# Altium schematic symbol library WR-TBL_Pluggable Connector.SchLib: 879 symbols (part 7 of 15)
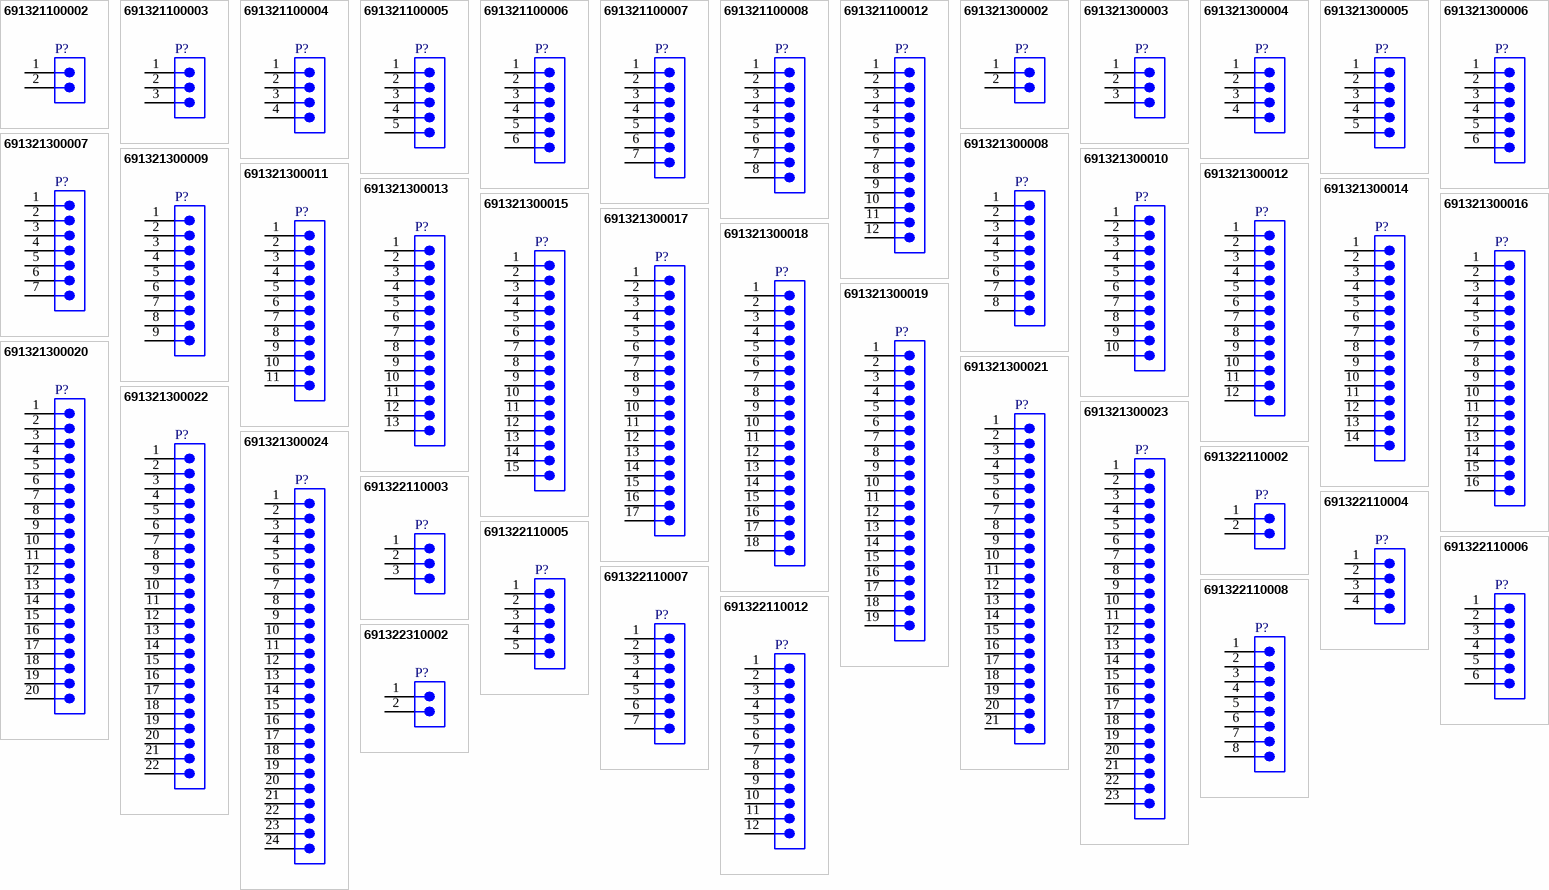
[diagram p27: symbols 691321100002 to 691322310002]

## 691321300018
designator P?  (value not drawn)
WR-TBL Series 321 Vertical PCB Header, THT, pitch 3.81mm, 18p; Manufacturer: Wurth Elektronik; Modularity: No; Rated Current: 10A; Working Voltage: 300V (AC); Manufacturer Part Number: 691321300018; Product Series: WR-TBL; ComponentLink1Description: Website Link; ComponentLink1URL: https://www.we-online.com; ComponentLink2Description: Datasheet Link; ComponentLink2URL: https://www.we-online.com/components/products/datasheet/691321300018; Mount: Through Hole; Operating Temperature Min: -40degC; Operating Temperature Max: 105degC; Packaging: Box; Application: Pluggable; Number of Pins: 18; Number of Rows: 1; Orientation: Vertical; Lead Pitch: 3.81mm
footprint 691321300018
pins: 1, 2, 3, 4, 5, 6, 7, 8, 9, 10, 11, 12, 13, 14, 15, 16, 17, 18

## 691321300019
designator P?  (value not drawn)
WR-TBL Series 321 Vertical PCB Header, THT, pitch 3.81mm, 19p; Manufacturer: Wurth Elektronik; Modularity: No; Rated Current: 10A; Working Voltage: 300V (AC); Manufacturer Part Number: 691321300019; Product Series: WR-TBL; ComponentLink1Description: Website Link; ComponentLink1URL: https://www.we-online.com; ComponentLink2Description: Datasheet Link; ComponentLink2URL: https://www.we-online.com/components/products/datasheet/691321300019; Mount: Through Hole; Operating Temperature Min: -40degC; Operating Temperature Max: 105degC; Packaging: Box; Application: Pluggable; Number of Pins: 19; Number of Rows: 1; Orientation: Vertical; Lead Pitch: 3.81mm
footprint 691321300019
pins: 1, 2, 3, 4, 5, 6, 7, 8, 9, 10, 11, 12, 13, 14, 15, 16, 17, 18, 19

## 691321300020
designator P?  (value not drawn)
WR-TBL Series 321 Vertical PCB Header, THT, pitch 3.81mm, 20p; Manufacturer: Wurth Elektronik; Modularity: No; Rated Current: 10A; Working Voltage: 300V (AC); Manufacturer Part Number: 691321300020; Product Series: WR-TBL; ComponentLink1Description: Website Link; ComponentLink1URL: https://www.we-online.com; ComponentLink2Description: Datasheet Link; ComponentLink2URL: https://www.we-online.com/components/products/datasheet/691321300020; Mount: Through Hole; Operating Temperature Min: -40degC; Operating Temperature Max: 105degC; Packaging: Box; Application: Pluggable; Number of Pins: 20; Number of Rows: 1; Orientation: Vertical; Lead Pitch: 3.81mm
footprint 691321300020
pins: 1, 2, 3, 4, 5, 6, 7, 8, 9, 10, 11, 12, 13, 14, 15, 16, 17, 18, 19, 20

## 691321300021
designator P?  (value not drawn)
WR-TBL Series 321 Vertical PCB Header, THT, pitch 3.81mm, 21p; Manufacturer: Wurth Elektronik; Modularity: No; Rated Current: 10A; Working Voltage: 300V (AC); Manufacturer Part Number: 691321300021; Product Series: WR-TBL; ComponentLink1Description: Website Link; ComponentLink1URL: https://www.we-online.com; ComponentLink2Description: Datasheet Link; ComponentLink2URL: https://www.we-online.com/components/products/datasheet/691321300021; Mount: Through Hole; Operating Temperature Min: -40degC; Operating Temperature Max: 105degC; Packaging: Box; Application: Pluggable; Number of Pins: 21; Number of Rows: 1; Orientation: Vertical; Lead Pitch: 3.81mm
footprint 691321300021
pins: 1, 2, 3, 4, 5, 6, 7, 8, 9, 10, 11, 12, 13, 14, 15, 16, 17, 18, 19, 20, 21

## 691321300022
designator P?  (value not drawn)
WR-TBL Series 321 Vertical PCB Header, THT, pitch 3.81mm, 22p; Manufacturer: Wurth Elektronik; Modularity: No; Rated Current: 10A; Working Voltage: 300V (AC); Manufacturer Part Number: 691321300022; Product Series: WR-TBL; ComponentLink1Description: Website Link; ComponentLink1URL: https://www.we-online.com; ComponentLink2Description: Datasheet Link; ComponentLink2URL: https://www.we-online.com/components/products/datasheet/691321300022; Mount: Through Hole; Operating Temperature Min: -40degC; Operating Temperature Max: 105degC; Packaging: Box; Application: Pluggable; Number of Pins: 22; Number of Rows: 1; Orientation: Vertical; Lead Pitch: 3.81mm
footprint 691321300022
pins: 1, 2, 3, 4, 5, 6, 7, 8, 9, 10, 11, 12, 13, 14, 15, 16, 17, 18, 19, 20, 21, 22

## 691321300023
designator P?  (value not drawn)
WR-TBL Series 321 Vertical PCB Header, THT, pitch 3.81mm, 23p; Manufacturer: Wurth Elektronik; Modularity: No; Rated Current: 10A; Working Voltage: 300V (AC); Manufacturer Part Number: 691321300023; Product Series: WR-TBL; ComponentLink1Description: Website Link; ComponentLink1URL: https://www.we-online.com; ComponentLink2Description: Datasheet Link; ComponentLink2URL: https://www.we-online.com/components/products/datasheet/691321300023; Mount: Through Hole; Operating Temperature Min: -40degC; Operating Temperature Max: 105degC; Packaging: Box; Application: Pluggable; Number of Pins: 23; Number of Rows: 1; Orientation: Vertical; Lead Pitch: 3.81mm
footprint 691321300023
pins: 1, 2, 3, 4, 5, 6, 7, 8, 9, 10, 11, 12, 13, 14, 15, 16, 17, 18, 19, 20, 21, 22, 23

## 691321300024
designator P?  (value not drawn)
WR-TBL Series 321 Vertical PCB Header, THT, pitch 3.81mm, 24p; Manufacturer: Wurth Elektronik; Modularity: No; Rated Current: 10A; Working Voltage: 300V (AC); Manufacturer Part Number: 691321300024; Product Series: WR-TBL; ComponentLink1Description: Website Link; ComponentLink1URL: https://www.we-online.com; ComponentLink2Description: Datasheet Link; ComponentLink2URL: https://www.we-online.com/components/products/datasheet/691321300024; Mount: Through Hole; Operating Temperature Min: -40degC; Operating Temperature Max: 105degC; Packaging: Box; Application: Pluggable; Number of Pins: 24; Number of Rows: 1; Orientation: Vertical; Lead Pitch: 3.81mm
footprint 691321300024
pins: 1, 2, 3, 4, 5, 6, 7, 8, 9, 10, 11, 12, 13, 14, 15, 16, 17, 18, 19, 20, 21, 22, 23, 24

## 691322110002
designator P?  (value not drawn)
WR-TBL Series 3221 Horizontal PCB Header, THT, pitch 3.5mm, 02p; Manufacturer: Wurth Elektronik; Modularity: No; Rated Current: 10A; Working Voltage: 300V (AC); Manufacturer Part Number: 691322110002; Product Series: WR-TBL; ComponentLink1Description: Website Link; ComponentLink1URL: https://www.we-online.com; ComponentLink2Description: Datasheet Link; ComponentLink2URL: https://www.we-online.com/components/products/datasheet/691322110002; Mount: Through Hole; Operating Temperature Min: -40degC; Operating Temperature Max: 105degC; Packaging: Box; Application: Pluggable; Number of Pins: 2; Number of Rows: 1; Orientation: Horizontal; Lead Pitch: 3.5mm
footprint 691322110002
pins: 1, 2

## 691322110003
designator P?  (value not drawn)
WR-TBL Series 3221 Horizontal PCB Header, THT, pitch 3.5mm, 03p; Manufacturer: Wurth Elektronik; Modularity: No; Rated Current: 10A; Working Voltage: 300V (AC); Manufacturer Part Number: 691322110003; Product Series: WR-TBL; ComponentLink1Description: Website Link; ComponentLink1URL: https://www.we-online.com; ComponentLink2Description: Datasheet Link; ComponentLink2URL: https://www.we-online.com/components/products/datasheet/691322110003; Mount: Through Hole; Operating Temperature Min: -40degC; Operating Temperature Max: 105degC; Packaging: Box; Application: Pluggable; Number of Pins: 3; Number of Rows: 1; Orientation: Horizontal; Lead Pitch: 3.5mm
footprint 691322110003
pins: 1, 2, 3

## 691322110004
designator P?  (value not drawn)
WR-TBL Series 3221 Horizontal PCB Header, THT, pitch 3.5mm, 04p; Manufacturer: Wurth Elektronik; Modularity: No; Rated Current: 10A; Working Voltage: 300V (AC); Manufacturer Part Number: 691322110004; Product Series: WR-TBL; ComponentLink1Description: Website Link; ComponentLink1URL: https://www.we-online.com; ComponentLink2Description: Datasheet Link; ComponentLink2URL: https://www.we-online.com/components/products/datasheet/691322110004; Mount: Through Hole; Operating Temperature Min: -40degC; Operating Temperature Max: 105degC; Packaging: Box; Application: Pluggable; Number of Pins: 4; Number of Rows: 1; Orientation: Horizontal; Lead Pitch: 3.5mm
footprint 691322110004
pins: 1, 2, 3, 4

## 691322110005
designator P?  (value not drawn)
WR-TBL Series 3221 Horizontal PCB Header, THT, pitch 3.5mm, 05p; Manufacturer: Wurth Elektronik; Modularity: No; Rated Current: 10A; Working Voltage: 300V (AC); Manufacturer Part Number: 691322110005; Product Series: WR-TBL; ComponentLink1Description: Website Link; ComponentLink1URL: https://www.we-online.com; ComponentLink2Description: Datasheet Link; ComponentLink2URL: https://www.we-online.com/components/products/datasheet/691322110005; Mount: Through Hole; Operating Temperature Min: -40degC; Operating Temperature Max: 105degC; Packaging: Box; Application: Pluggable; Number of Pins: 5; Number of Rows: 1; Orientation: Horizontal; Lead Pitch: 3.5mm
footprint 691322110005
pins: 1, 2, 3, 4, 5

## 691322110006
designator P?  (value not drawn)
WR-TBL Series 3221 Horizontal PCB Header, THT, pitch 3.5mm, 06p; Manufacturer: Wurth Elektronik; Modularity: No; Rated Current: 10A; Working Voltage: 300V (AC); Manufacturer Part Number: 691322110006; Product Series: WR-TBL; ComponentLink1Description: Website Link; ComponentLink1URL: https://www.we-online.com; ComponentLink2Description: Datasheet Link; ComponentLink2URL: https://www.we-online.com/components/products/datasheet/691322110006; Mount: Through Hole; Operating Temperature Min: -40degC; Operating Temperature Max: 105degC; Packaging: Box; Application: Pluggable; Number of Pins: 6; Number of Rows: 1; Orientation: Horizontal; Lead Pitch: 3.5mm
footprint 691322110006
pins: 1, 2, 3, 4, 5, 6

## 691322110007
designator P?  (value not drawn)
WR-TBL Series 3221 Horizontal PCB Header, THT, pitch 3.5mm, 07p; Manufacturer: Wurth Elektronik; Modularity: No; Rated Current: 10A; Working Voltage: 300V (AC); Manufacturer Part Number: 691322110007; Product Series: WR-TBL; ComponentLink1Description: Website Link; ComponentLink1URL: https://www.we-online.com; ComponentLink2Description: Datasheet Link; ComponentLink2URL: https://www.we-online.com/components/products/datasheet/691322110007; Mount: Through Hole; Operating Temperature Min: -40degC; Operating Temperature Max: 105degC; Packaging: Box; Application: Pluggable; Number of Pins: 7; Number of Rows: 1; Orientation: Horizontal; Lead Pitch: 3.5mm
footprint 691322110007
pins: 1, 2, 3, 4, 5, 6, 7

## 691322110008
designator P?  (value not drawn)
WR-TBL Series 3221 Horizontal PCB Header, THT, pitch 3.5mm, 08p; Manufacturer: Wurth Elektronik; Modularity: No; Rated Current: 10A; Working Voltage: 300V (AC); Manufacturer Part Number: 691322110008; Product Series: WR-TBL; ComponentLink1Description: Website Link; ComponentLink1URL: https://www.we-online.com; ComponentLink2Description: Datasheet Link; ComponentLink2URL: https://www.we-online.com/components/products/datasheet/691322110008; Mount: Through Hole; Operating Temperature Min: -40degC; Operating Temperature Max: 105degC; Packaging: Box; Application: Pluggable; Number of Pins: 8; Number of Rows: 1; Orientation: Horizontal; Lead Pitch: 3.5mm
footprint 691322110008
pins: 1, 2, 3, 4, 5, 6, 7, 8

## 691322110012
designator P?  (value not drawn)
WR-TBL Series 3221 Horizontal PCB Header, THT, pitch 3.5mm, 12p; Manufacturer: Wurth Elektronik; Modularity: No; Rated Current: 10A; Working Voltage: 300V (AC); Manufacturer Part Number: 691322110012; Product Series: WR-TBL; ComponentLink1Description: Website Link; ComponentLink1URL: https://www.we-online.com; ComponentLink2Description: Datasheet Link; ComponentLink2URL: https://www.we-online.com/components/products/datasheet/691322110012; Mount: Through Hole; Operating Temperature Min: -40degC; Operating Temperature Max: 105degC; Packaging: Box; Application: Pluggable; Number of Pins: 12; Number of Rows: 1; Orientation: Horizontal; Lead Pitch: 3.5mm
footprint 691322110012
pins: 1, 2, 3, 4, 5, 6, 7, 8, 9, 10, 11, 12

## 691322310002
designator P?  (value not drawn)
WR-TBL Series 322 Horizontal PCB Header, THT, pitch 3.81mm, 02p; Manufacturer: Wurth Elektronik; Modularity: No; Rated Current: 10A; Working Voltage: 300V (AC); Manufacturer Part Number: 691322310002; Product Series: WR-TBL; ComponentLink1Description: Website Link; ComponentLink1URL: https://www.we-online.com; ComponentLink2Description: Datasheet Link; ComponentLink2URL: https://www.we-online.com/components/products/datasheet/691322310002; Mount: Through Hole; Operating Temperature Min: -40degC; Operating Temperature Max: 105degC; Packaging: Box; Application: Pluggable; Number of Pins: 2; Number of Rows: 1; Orientation: Horizontal; Lead Pitch: 3.81mm
footprint 691322310002
pins: 1, 2

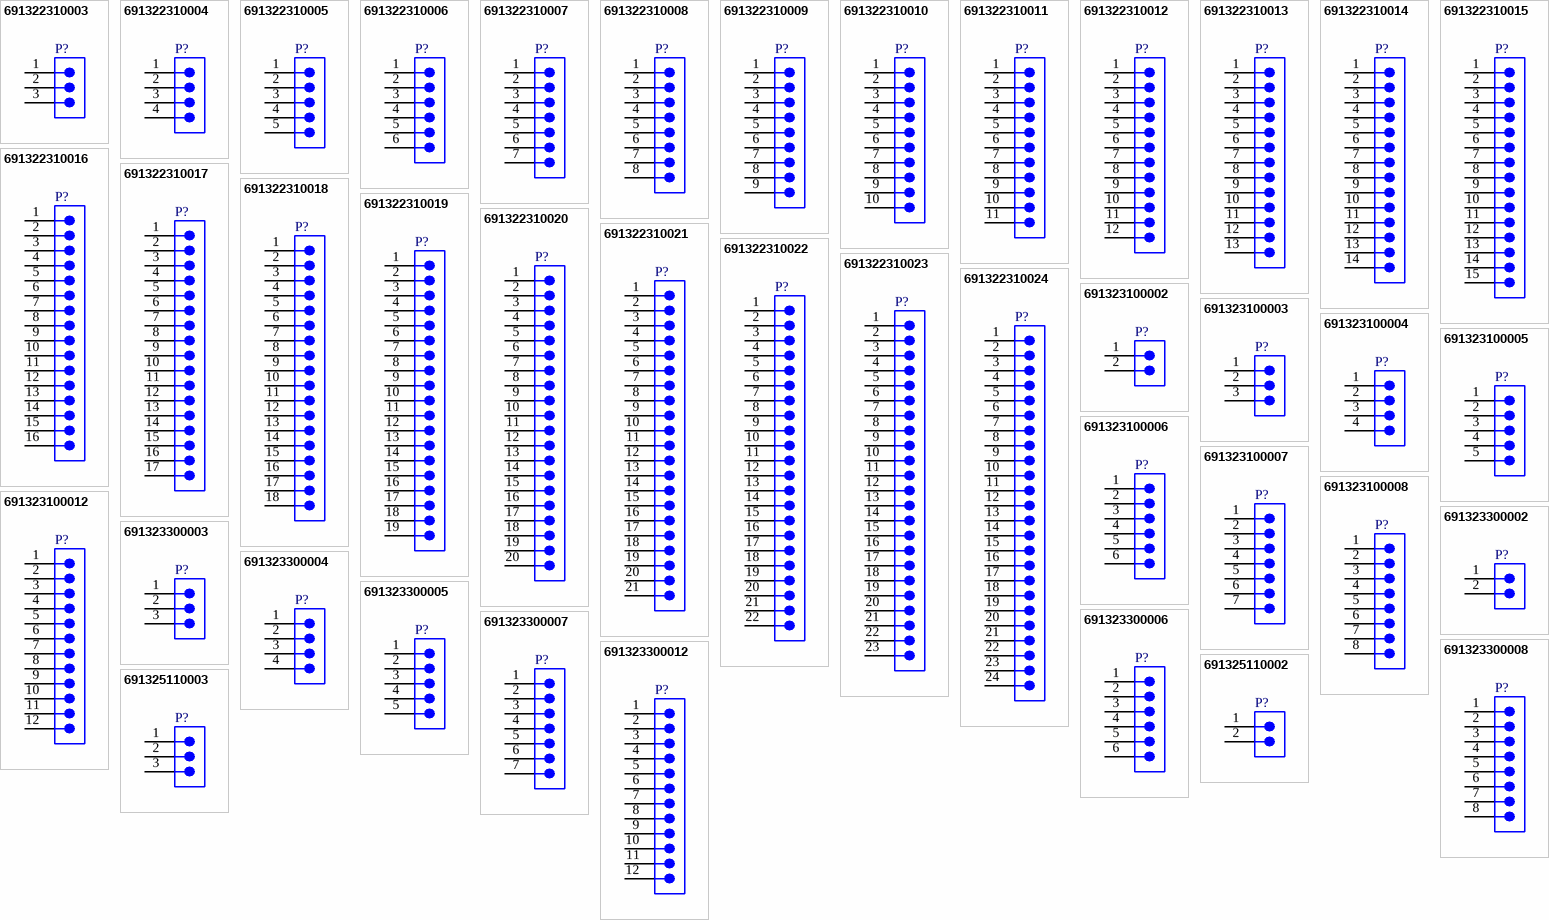
[diagram p10: symbols 691322310003 to 691325110003]

## 691322310003
designator P?  (value not drawn)
WR-TBL Series 322 Horizontal PCB Header, THT, pitch 3.81mm, 03p; Manufacturer: Wurth Elektronik; Modularity: No; Rated Current: 10A; Working Voltage: 300V (AC); Manufacturer Part Number: 691322310003; Product Series: WR-TBL; ComponentLink1Description: Website Link; ComponentLink1URL: https://www.we-online.com; ComponentLink2Description: Datasheet Link; ComponentLink2URL: https://www.we-online.com/components/products/datasheet/691322310003; Mount: Through Hole; Operating Temperature Min: -40degC; Operating Temperature Max: 105degC; Packaging: Box; Application: Pluggable; Number of Pins: 3; Number of Rows: 1; Orientation: Horizontal; Lead Pitch: 3.81mm
footprint 691322310003
pins: 1, 2, 3

## 691322310004
designator P?  (value not drawn)
WR-TBL Series 322 Horizontal PCB Header, THT, pitch 3.81mm, 04p; Manufacturer: Wurth Elektronik; Modularity: No; Rated Current: 10A; Working Voltage: 300V (AC); Manufacturer Part Number: 691322310004; Product Series: WR-TBL; ComponentLink1Description: Website Link; ComponentLink1URL: https://www.we-online.com; ComponentLink2Description: Datasheet Link; ComponentLink2URL: https://www.we-online.com/components/products/datasheet/691322310004; Mount: Through Hole; Operating Temperature Min: -40degC; Operating Temperature Max: 105degC; Packaging: Box; Application: Pluggable; Number of Pins: 4; Number of Rows: 1; Orientation: Horizontal; Lead Pitch: 3.81mm
footprint 691322310004
pins: 1, 2, 3, 4

## 691322310005
designator P?  (value not drawn)
WR-TBL Series 322 Horizontal PCB Header, THT, pitch 3.81mm, 05p; Manufacturer: Wurth Elektronik; Modularity: No; Rated Current: 10A; Working Voltage: 300V (AC); Manufacturer Part Number: 691322310005; Product Series: WR-TBL; ComponentLink1Description: Website Link; ComponentLink1URL: https://www.we-online.com; ComponentLink2Description: Datasheet Link; ComponentLink2URL: https://www.we-online.com/components/products/datasheet/691322310005; Mount: Through Hole; Operating Temperature Min: -40degC; Operating Temperature Max: 105degC; Packaging: Box; Application: Pluggable; Number of Pins: 5; Number of Rows: 1; Orientation: Horizontal; Lead Pitch: 3.81mm
footprint 691322310005
pins: 1, 2, 3, 4, 5

## 691322310006
designator P?  (value not drawn)
WR-TBL Series 322 Horizontal PCB Header, THT, pitch 3.81mm, 06p; Manufacturer: Wurth Elektronik; Modularity: No; Rated Current: 10A; Working Voltage: 300V (AC); Manufacturer Part Number: 691322310006; Product Series: WR-TBL; ComponentLink1Description: Website Link; ComponentLink1URL: https://www.we-online.com; ComponentLink2Description: Datasheet Link; ComponentLink2URL: https://www.we-online.com/components/products/datasheet/691322310006; Mount: Through Hole; Operating Temperature Min: -40degC; Operating Temperature Max: 105degC; Packaging: Box; Application: Pluggable; Number of Pins: 6; Number of Rows: 1; Orientation: Horizontal; Lead Pitch: 3.81mm
footprint 691322310006
pins: 1, 2, 3, 4, 5, 6

## 691322310007
designator P?  (value not drawn)
WR-TBL Series 322 Horizontal PCB Header, THT, pitch 3.81mm, 07p; Manufacturer: Wurth Elektronik; Modularity: No; Rated Current: 10A; Working Voltage: 300V (AC); Manufacturer Part Number: 691322310007; Product Series: WR-TBL; ComponentLink1Description: Website Link; ComponentLink1URL: https://www.we-online.com; ComponentLink2Description: Datasheet Link; ComponentLink2URL: https://www.we-online.com/components/products/datasheet/691322310007; Mount: Through Hole; Operating Temperature Min: -40degC; Operating Temperature Max: 105degC; Packaging: Box; Application: Pluggable; Number of Pins: 7; Number of Rows: 1; Orientation: Horizontal; Lead Pitch: 3.81mm
footprint 691322310007
pins: 1, 2, 3, 4, 5, 6, 7

## 691322310008
designator P?  (value not drawn)
WR-TBL Series 322 Horizontal PCB Header, THT, pitch 3.81mm, 08p; Manufacturer: Wurth Elektronik; Modularity: No; Rated Current: 10A; Working Voltage: 300V (AC); Manufacturer Part Number: 691322310008; Product Series: WR-TBL; ComponentLink1Description: Website Link; ComponentLink1URL: https://www.we-online.com; ComponentLink2Description: Datasheet Link; ComponentLink2URL: https://www.we-online.com/components/products/datasheet/691322310008; Mount: Through Hole; Operating Temperature Min: -40degC; Operating Temperature Max: 105degC; Packaging: Box; Application: Pluggable; Number of Pins: 8; Number of Rows: 1; Orientation: Horizontal; Lead Pitch: 3.81mm
footprint 691322310008
pins: 1, 2, 3, 4, 5, 6, 7, 8

## 691322310009
designator P?  (value not drawn)
WR-TBL Series 322 Horizontal PCB Header, THT, pitch 3.81mm, 09p; Manufacturer: Wurth Elektronik; Modularity: No; Rated Current: 10A; Working Voltage: 300V (AC); Manufacturer Part Number: 691322310009; Product Series: WR-TBL; ComponentLink1Description: Website Link; ComponentLink1URL: https://www.we-online.com; ComponentLink2Description: Datasheet Link; ComponentLink2URL: https://www.we-online.com/components/products/datasheet/691322310009; Mount: Through Hole; Operating Temperature Min: -40degC; Operating Temperature Max: 105degC; Packaging: Box; Application: Pluggable; Number of Pins: 9; Number of Rows: 1; Orientation: Horizontal; Lead Pitch: 3.81mm
footprint 691322310009
pins: 1, 2, 3, 4, 5, 6, 7, 8, 9

## 691322310010
designator P?  (value not drawn)
WR-TBL Series 322 Horizontal PCB Header, THT, pitch 3.81mm, 10p; Manufacturer: Wurth Elektronik; Modularity: No; Rated Current: 10A; Working Voltage: 300V (AC); Manufacturer Part Number: 691322310010; Product Series: WR-TBL; ComponentLink1Description: Website Link; ComponentLink1URL: https://www.we-online.com; ComponentLink2Description: Datasheet Link; ComponentLink2URL: https://www.we-online.com/components/products/datasheet/691322310010; Mount: Through Hole; Operating Temperature Min: -40degC; Operating Temperature Max: 105degC; Packaging: Box; Application: Pluggable; Number of Pins: 10; Number of Rows: 1; Orientation: Horizontal; Lead Pitch: 3.81mm
footprint 691322310010
pins: 1, 2, 3, 4, 5, 6, 7, 8, 9, 10

## 691322310011
designator P?  (value not drawn)
WR-TBL Series 322 Horizontal PCB Header, THT, pitch 3.81mm, 11p; Manufacturer: Wurth Elektronik; Modularity: No; Rated Current: 10A; Working Voltage: 300V (AC); Manufacturer Part Number: 691322310011; Product Series: WR-TBL; ComponentLink1Description: Website Link; ComponentLink1URL: https://www.we-online.com; ComponentLink2Description: Datasheet Link; ComponentLink2URL: https://www.we-online.com/components/products/datasheet/691322310011; Mount: Through Hole; Operating Temperature Min: -40degC; Operating Temperature Max: 105degC; Packaging: Box; Application: Pluggable; Number of Pins: 11; Number of Rows: 1; Orientation: Horizontal; Lead Pitch: 3.81mm
footprint 691322310011
pins: 1, 2, 3, 4, 5, 6, 7, 8, 9, 10, 11

## 691322310012
designator P?  (value not drawn)
WR-TBL Series 322 Horizontal PCB Header, THT, pitch 3.81mm, 12p; Manufacturer: Wurth Elektronik; Modularity: No; Rated Current: 10A; Working Voltage: 300V (AC); Manufacturer Part Number: 691322310012; Product Series: WR-TBL; ComponentLink1Description: Website Link; ComponentLink1URL: https://www.we-online.com; ComponentLink2Description: Datasheet Link; ComponentLink2URL: https://www.we-online.com/components/products/datasheet/691322310012; Mount: Through Hole; Operating Temperature Min: -40degC; Operating Temperature Max: 105degC; Packaging: Box; Application: Pluggable; Number of Pins: 12; Number of Rows: 1; Orientation: Horizontal; Lead Pitch: 3.81mm
footprint 691322310012
pins: 1, 2, 3, 4, 5, 6, 7, 8, 9, 10, 11, 12

## 691322310013
designator P?  (value not drawn)
WR-TBL Series 322 Horizontal PCB Header, THT, pitch 3.81mm, 13p; Manufacturer: Wurth Elektronik; Modularity: No; Rated Current: 10A; Working Voltage: 300V (AC); Manufacturer Part Number: 691322310013; Product Series: WR-TBL; ComponentLink1Description: Website Link; ComponentLink1URL: https://www.we-online.com; ComponentLink2Description: Datasheet Link; ComponentLink2URL: https://www.we-online.com/components/products/datasheet/691322310013; Mount: Through Hole; Operating Temperature Min: -40degC; Operating Temperature Max: 105degC; Packaging: Box; Application: Pluggable; Number of Pins: 13; Number of Rows: 1; Orientation: Horizontal; Lead Pitch: 3.81mm
footprint 691322310013
pins: 1, 2, 3, 4, 5, 6, 7, 8, 9, 10, 11, 12, 13

## 691322310014
designator P?  (value not drawn)
WR-TBL Series 322 Horizontal PCB Header, THT, pitch 3.81mm, 14p; Manufacturer: Wurth Elektronik; Modularity: No; Rated Current: 10A; Working Voltage: 300V (AC); Manufacturer Part Number: 691322310014; Product Series: WR-TBL; ComponentLink1Description: Website Link; ComponentLink1URL: https://www.we-online.com; ComponentLink2Description: Datasheet Link; ComponentLink2URL: https://www.we-online.com/components/products/datasheet/691322310014; Mount: Through Hole; Operating Temperature Min: -40degC; Operating Temperature Max: 105degC; Packaging: Box; Application: Pluggable; Number of Pins: 14; Number of Rows: 1; Orientation: Horizontal; Lead Pitch: 3.81mm
footprint 691322310014
pins: 1, 2, 3, 4, 5, 6, 7, 8, 9, 10, 11, 12, 13, 14

## 691322310015
designator P?  (value not drawn)
WR-TBL Series 322 Horizontal PCB Header, THT, pitch 3.81mm, 15p; Manufacturer: Wurth Elektronik; Modularity: No; Rated Current: 10A; Working Voltage: 300V (AC); Manufacturer Part Number: 691322310015; Product Series: WR-TBL; ComponentLink1Description: Website Link; ComponentLink1URL: https://www.we-online.com; ComponentLink2Description: Datasheet Link; ComponentLink2URL: https://www.we-online.com/components/products/datasheet/691322310015; Mount: Through Hole; Operating Temperature Min: -40degC; Operating Temperature Max: 105degC; Packaging: Box; Application: Pluggable; Number of Pins: 15; Number of Rows: 1; Orientation: Horizontal; Lead Pitch: 3.81mm
footprint 691322310015
pins: 1, 2, 3, 4, 5, 6, 7, 8, 9, 10, 11, 12, 13, 14, 15

## 691322310016
designator P?  (value not drawn)
WR-TBL Series 322 Horizontal PCB Header, THT, pitch 3.81mm, 16p; Manufacturer: Wurth Elektronik; Modularity: No; Rated Current: 10A; Working Voltage: 300V (AC); Manufacturer Part Number: 691322310016; Product Series: WR-TBL; ComponentLink1Description: Website Link; ComponentLink1URL: https://www.we-online.com; ComponentLink2Description: Datasheet Link; ComponentLink2URL: https://www.we-online.com/components/products/datasheet/691322310016; Mount: Through Hole; Operating Temperature Min: -40degC; Operating Temperature Max: 105degC; Packaging: Box; Application: Pluggable; Number of Pins: 16; Number of Rows: 1; Orientation: Horizontal; Lead Pitch: 3.81mm
footprint 691322310016
pins: 1, 2, 3, 4, 5, 6, 7, 8, 9, 10, 11, 12, 13, 14, 15, 16

## 691322310017
designator P?  (value not drawn)
WR-TBL Series 322 Horizontal PCB Header, THT, pitch 3.81mm, 17p; Manufacturer: Wurth Elektronik; Modularity: No; Rated Current: 10A; Working Voltage: 300V (AC); Manufacturer Part Number: 691322310017; Product Series: WR-TBL; ComponentLink1Description: Website Link; ComponentLink1URL: https://www.we-online.com; ComponentLink2Description: Datasheet Link; ComponentLink2URL: https://www.we-online.com/components/products/datasheet/691322310017; Mount: Through Hole; Operating Temperature Min: -40degC; Operating Temperature Max: 105degC; Packaging: Box; Application: Pluggable; Number of Pins: 17; Number of Rows: 1; Orientation: Horizontal; Lead Pitch: 3.81mm
footprint 691322310017
pins: 1, 2, 3, 4, 5, 6, 7, 8, 9, 10, 11, 12, 13, 14, 15, 16, 17

## 691322310018
designator P?  (value not drawn)
WR-TBL Series 322 Horizontal PCB Header, THT, pitch 3.81mm, 18p; Manufacturer: Wurth Elektronik; Modularity: No; Rated Current: 10A; Working Voltage: 300V (AC); Manufacturer Part Number: 691322310018; Product Series: WR-TBL; ComponentLink1Description: Website Link; ComponentLink1URL: https://www.we-online.com; ComponentLink2Description: Datasheet Link; ComponentLink2URL: https://www.we-online.com/components/products/datasheet/691322310018; Mount: Through Hole; Operating Temperature Min: -40degC; Operating Temperature Max: 105degC; Packaging: Box; Application: Pluggable; Number of Pins: 18; Number of Rows: 1; Orientation: Horizontal; Lead Pitch: 3.81mm
footprint 691322310018
pins: 1, 2, 3, 4, 5, 6, 7, 8, 9, 10, 11, 12, 13, 14, 15, 16, 17, 18

## 691322310019
designator P?  (value not drawn)
WR-TBL Series 322 Horizontal PCB Header, THT, pitch 3.81mm, 19p; Manufacturer: Wurth Elektronik; Modularity: No; Rated Current: 10A; Working Voltage: 300V (AC); Manufacturer Part Number: 691322310019; Product Series: WR-TBL; ComponentLink1Description: Website Link; ComponentLink1URL: https://www.we-online.com; ComponentLink2Description: Datasheet Link; ComponentLink2URL: https://www.we-online.com/components/products/datasheet/691322310019; Mount: Through Hole; Operating Temperature Min: -40degC; Operating Temperature Max: 105degC; Packaging: Box; Application: Pluggable; Number of Pins: 19; Number of Rows: 1; Orientation: Horizontal; Lead Pitch: 3.81mm
footprint 691322310019
pins: 1, 2, 3, 4, 5, 6, 7, 8, 9, 10, 11, 12, 13, 14, 15, 16, 17, 18, 19

## 691322310020
designator P?  (value not drawn)
WR-TBL Series 322 Horizontal PCB Header, THT, pitch 3.81mm, 20p; Manufacturer: Wurth Elektronik; Modularity: No; Rated Current: 10A; Working Voltage: 300V (AC); Manufacturer Part Number: 691322310020; Product Series: WR-TBL; ComponentLink1Description: Website Link; ComponentLink1URL: https://www.we-online.com; ComponentLink2Description: Datasheet Link; ComponentLink2URL: https://www.we-online.com/components/products/datasheet/691322310020; Mount: Through Hole; Operating Temperature Min: -40degC; Operating Temperature Max: 105degC; Packaging: Box; Application: Pluggable; Number of Pins: 20; Number of Rows: 1; Orientation: Horizontal; Lead Pitch: 3.81mm
footprint 691322310020
pins: 1, 2, 3, 4, 5, 6, 7, 8, 9, 10, 11, 12, 13, 14, 15, 16, 17, 18, 19, 20

## 691322310021
designator P?  (value not drawn)
WR-TBL Series 322 Horizontal PCB Header, THT, pitch 3.81mm, 21p; Manufacturer: Wurth Elektronik; Modularity: No; Rated Current: 10A; Working Voltage: 300V (AC); Manufacturer Part Number: 691322310021; Product Series: WR-TBL; ComponentLink1Description: Website Link; ComponentLink1URL: https://www.we-online.com; ComponentLink2Description: Datasheet Link; ComponentLink2URL: https://www.we-online.com/components/products/datasheet/691322310021; Mount: Through Hole; Operating Temperature Min: -40degC; Operating Temperature Max: 105degC; Packaging: Box; Application: Pluggable; Number of Pins: 21; Number of Rows: 1; Orientation: Horizontal; Lead Pitch: 3.81mm
footprint 691322310021
pins: 1, 2, 3, 4, 5, 6, 7, 8, 9, 10, 11, 12, 13, 14, 15, 16, 17, 18, 19, 20, 21

## 691322310022
designator P?  (value not drawn)
WR-TBL Series 322 Horizontal PCB Header, THT, pitch 3.81mm, 22p; Manufacturer: Wurth Elektronik; Modularity: No; Rated Current: 10A; Working Voltage: 300V (AC); Manufacturer Part Number: 691322310022; Product Series: WR-TBL; ComponentLink1Description: Website Link; ComponentLink1URL: https://www.we-online.com; ComponentLink2Description: Datasheet Link; ComponentLink2URL: https://www.we-online.com/components/products/datasheet/691322310022; Mount: Through Hole; Operating Temperature Min: -40degC; Operating Temperature Max: 105degC; Packaging: Box; Application: Pluggable; Number of Pins: 22; Number of Rows: 1; Orientation: Horizontal; Lead Pitch: 3.81mm
footprint 691322310022
pins: 1, 2, 3, 4, 5, 6, 7, 8, 9, 10, 11, 12, 13, 14, 15, 16, 17, 18, 19, 20, 21, 22

## 691322310023
designator P?  (value not drawn)
WR-TBL Series 322 Horizontal PCB Header, THT, pitch 3.81mm, 23p; Manufacturer: Wurth Elektronik; Modularity: No; Rated Current: 10A; Working Voltage: 300V (AC); Manufacturer Part Number: 691322310023; Product Series: WR-TBL; ComponentLink1Description: Website Link; ComponentLink1URL: https://www.we-online.com; ComponentLink2Description: Datasheet Link; ComponentLink2URL: https://www.we-online.com/components/products/datasheet/691322310023; Mount: Through Hole; Operating Temperature Min: -40degC; Operating Temperature Max: 105degC; Packaging: Box; Application: Pluggable; Number of Pins: 23; Number of Rows: 1; Orientation: Horizontal; Lead Pitch: 3.81mm
footprint 691322310023
pins: 1, 2, 3, 4, 5, 6, 7, 8, 9, 10, 11, 12, 13, 14, 15, 16, 17, 18, 19, 20, 21, 22, 23

## 691322310024
designator P?  (value not drawn)
WR-TBL Series 322 Horizontal PCB Header, THT, pitch 3.81mm, 24p; Manufacturer: Wurth Elektronik; Modularity: No; Rated Current: 10A; Working Voltage: 300V (AC); Manufacturer Part Number: 691322310024; Product Series: WR-TBL; ComponentLink1Description: Website Link; ComponentLink1URL: https://www.we-online.com; ComponentLink2Description: Datasheet Link; ComponentLink2URL: https://www.we-online.com/components/products/datasheet/691322310024; Mount: Through Hole; Operating Temperature Min: -40degC; Operating Temperature Max: 105degC; Packaging: Box; Application: Pluggable; Number of Pins: 24; Number of Rows: 1; Orientation: Horizontal; Lead Pitch: 3.81mm
footprint 691322310024
pins: 1, 2, 3, 4, 5, 6, 7, 8, 9, 10, 11, 12, 13, 14, 15, 16, 17, 18, 19, 20, 21, 22, 23, 24

## 691323100002
designator P?  (value not drawn)
WR-TBL Series 3231 Vertical PCB Header with Flanges, THT, pitch 3.5mm, 02p; Manufacturer: Wurth Elektronik; Modularity: No; Rated Current: 10A; Working Voltage: 300V (AC); Manufacturer Part Number: 691323100002; Product Series: WR-TBL; ComponentLink1Description: Website Link; ComponentLink1URL: https://www.we-online.com; ComponentLink2Description: Datasheet Link; ComponentLink2URL: https://www.we-online.com/components/products/datasheet/691323100002; Mount: Through Hole; Operating Temperature Min: -40degC; Operating Temperature Max: 105degC; Packaging: Box; Application: Pluggable; Number of Pins: 2; Number of Rows: 1; Orientation: Vertical; Lead Pitch: 3.5mm
footprint 691323100002
pins: 1, 2

## 691323100003
designator P?  (value not drawn)
WR-TBL Series 3231 Vertical PCB Header with Flanges, THT, pitch 3.5mm, 03p; Manufacturer: Wurth Elektronik; Modularity: No; Rated Current: 10A; Working Voltage: 300V (AC); Manufacturer Part Number: 691323100003; Product Series: WR-TBL; ComponentLink1Description: Website Link; ComponentLink1URL: https://www.we-online.com; ComponentLink2Description: Datasheet Link; ComponentLink2URL: https://www.we-online.com/components/products/datasheet/691323100003; Mount: Through Hole; Operating Temperature Min: -40degC; Operating Temperature Max: 105degC; Packaging: Box; Application: Pluggable; Number of Pins: 3; Number of Rows: 1; Orientation: Vertical; Lead Pitch: 3.5mm
footprint 691323100003
pins: 1, 2, 3

## 691323100004
designator P?  (value not drawn)
WR-TBL Series 3231 Vertical PCB Header with Flanges, THT, pitch 3.5mm, 04p; Manufacturer: Wurth Elektronik; Modularity: No; Rated Current: 10A; Working Voltage: 300V (AC); Manufacturer Part Number: 691323100004; Product Series: WR-TBL; ComponentLink1Description: Website Link; ComponentLink1URL: https://www.we-online.com; ComponentLink2Description: Datasheet Link; ComponentLink2URL: https://www.we-online.com/components/products/datasheet/691323100004; Mount: Through Hole; Operating Temperature Min: -40degC; Operating Temperature Max: 105degC; Packaging: Box; Application: Pluggable; Number of Pins: 4; Number of Rows: 1; Orientation: Vertical; Lead Pitch: 3.5mm
footprint 691323100004
pins: 1, 2, 3, 4

## 691323100005
designator P?  (value not drawn)
WR-TBL Series 3231 Vertical PCB Header with Flanges, THT, pitch 3.5mm, 05p; Manufacturer: Wurth Elektronik; Modularity: No; Rated Current: 10A; Working Voltage: 300V (AC); Manufacturer Part Number: 691323100005; Product Series: WR-TBL; ComponentLink1Description: Website Link; ComponentLink1URL: https://www.we-online.com; ComponentLink2Description: Datasheet Link; ComponentLink2URL: https://www.we-online.com/components/products/datasheet/691323100005; Mount: Through Hole; Operating Temperature Min: -40degC; Operating Temperature Max: 105degC; Packaging: Box; Application: Pluggable; Number of Pins: 5; Number of Rows: 1; Orientation: Vertical; Lead Pitch: 3.5mm
footprint 691323100005
pins: 1, 2, 3, 4, 5

## 691323100006
designator P?  (value not drawn)
WR-TBL Series 3231 Vertical PCB Header with Flanges, THT, pitch 3.5mm, 06p; Manufacturer: Wurth Elektronik; Modularity: No; Rated Current: 10A; Working Voltage: 300V (AC); Manufacturer Part Number: 691323100006; Product Series: WR-TBL; ComponentLink1Description: Website Link; ComponentLink1URL: https://www.we-online.com; ComponentLink2Description: Datasheet Link; ComponentLink2URL: https://www.we-online.com/components/products/datasheet/691323100006; Mount: Through Hole; Operating Temperature Min: -40degC; Operating Temperature Max: 105degC; Packaging: Box; Application: Pluggable; Number of Pins: 6; Number of Rows: 1; Orientation: Vertical; Lead Pitch: 3.5mm
footprint 691323100006
pins: 1, 2, 3, 4, 5, 6

## 691323100007
designator P?  (value not drawn)
WR-TBL Series 3231 Vertical PCB Header with Flanges, THT, pitch 3.5mm, 07p; Manufacturer: Wurth Elektronik; Modularity: No; Rated Current: 10A; Working Voltage: 300V (AC); Manufacturer Part Number: 691323100007; Product Series: WR-TBL; ComponentLink1Description: Website Link; ComponentLink1URL: https://www.we-online.com; ComponentLink2Description: Datasheet Link; ComponentLink2URL: https://www.we-online.com/components/products/datasheet/691323100007; Mount: Through Hole; Operating Temperature Min: -40degC; Operating Temperature Max: 105degC; Packaging: Box; Application: Pluggable; Number of Pins: 7; Number of Rows: 1; Orientation: Vertical; Lead Pitch: 3.5mm
footprint 691323100007
pins: 1, 2, 3, 4, 5, 6, 7

## 691323100008
designator P?  (value not drawn)
WR-TBL Series 3231 Vertical PCB Header with Flanges, THT, pitch 3.5mm, 08p; Manufacturer: Wurth Elektronik; Modularity: No; Rated Current: 10A; Working Voltage: 300V (AC); Manufacturer Part Number: 691323100008; Product Series: WR-TBL; ComponentLink1Description: Website Link; ComponentLink1URL: https://www.we-online.com; ComponentLink2Description: Datasheet Link; ComponentLink2URL: https://www.we-online.com/components/products/datasheet/691323100008; Mount: Through Hole; Operating Temperature Min: -40degC; Operating Temperature Max: 105degC; Packaging: Box; Application: Pluggable; Number of Pins: 8; Number of Rows: 1; Orientation: Vertical; Lead Pitch: 3.5mm
footprint 691323100008
pins: 1, 2, 3, 4, 5, 6, 7, 8

## 691323100012
designator P?  (value not drawn)
WR-TBL Series 3231 Vertical PCB Header with Flanges, THT, pitch 3.5mm, 12p; Manufacturer: Wurth Elektronik; Modularity: No; Rated Current: 10A; Working Voltage: 300V (AC); Manufacturer Part Number: 691323100012; Product Series: WR-TBL; ComponentLink1Description: Website Link; ComponentLink1URL: https://www.we-online.com; ComponentLink2Description: Datasheet Link; ComponentLink2URL: https://www.we-online.com/components/products/datasheet/691323100012; Mount: Through Hole; Operating Temperature Min: -40degC; Operating Temperature Max: 105degC; Packaging: Box; Application: Pluggable; Number of Pins: 12; Number of Rows: 1; Orientation: Vertical; Lead Pitch: 3.5mm
footprint 691323100012
pins: 1, 2, 3, 4, 5, 6, 7, 8, 9, 10, 11, 12

## 691323300002
designator P?  (value not drawn)
WR-TBL Series 3233 Vertical PCB Header with Flanges, THT, pitch 3.81mm, 02p; Manufacturer: Wurth Elektronik; Modularity: No; Rated Current: 10A; Working Voltage: 300V (AC); Manufacturer Part Number: 691323300002; Product Series: WR-TBL; ComponentLink1Description: Website Link; ComponentLink1URL: https://www.we-online.com; ComponentLink2Description: Datasheet Link; ComponentLink2URL: https://www.we-online.com/components/products/datasheet/691323300002; Mount: Through Hole; Operating Temperature Min: -40degC; Operating Temperature Max: 105degC; Packaging: Box; Application: Pluggable; Number of Pins: 2; Number of Rows: 1; Orientation: Vertical; Lead Pitch: 3.81mm
footprint 691323300002
pins: 1, 2

## 691323300003
designator P?  (value not drawn)
WR-TBL Series 3233 Vertical PCB Header with Flanges, THT, pitch 3.81mm, 03p; Manufacturer: Wurth Elektronik; Modularity: No; Rated Current: 10A; Working Voltage: 300V (AC); Manufacturer Part Number: 691323300003; Product Series: WR-TBL; ComponentLink1Description: Website Link; ComponentLink1URL: https://www.we-online.com; ComponentLink2Description: Datasheet Link; ComponentLink2URL: https://www.we-online.com/components/products/datasheet/691323300003; Mount: Through Hole; Operating Temperature Min: -40degC; Operating Temperature Max: 105degC; Packaging: Box; Application: Pluggable; Number of Pins: 3; Number of Rows: 1; Orientation: Vertical; Lead Pitch: 3.81mm
footprint 691323300003
pins: 1, 2, 3

## 691323300004
designator P?  (value not drawn)
WR-TBL Series 3233 Vertical PCB Header with Flanges, THT, pitch 3.81mm, 04p; Manufacturer: Wurth Elektronik; Modularity: No; Rated Current: 10A; Working Voltage: 300V (AC); Manufacturer Part Number: 691323300004; Product Series: WR-TBL; ComponentLink1Description: Website Link; ComponentLink1URL: https://www.we-online.com; ComponentLink2Description: Datasheet Link; ComponentLink2URL: https://www.we-online.com/components/products/datasheet/691323300004; Mount: Through Hole; Operating Temperature Min: -40degC; Operating Temperature Max: 105degC; Packaging: Box; Application: Pluggable; Number of Pins: 4; Number of Rows: 1; Orientation: Vertical; Lead Pitch: 3.81mm
footprint 691323300004
pins: 1, 2, 3, 4

## 691323300005
designator P?  (value not drawn)
WR-TBL Series 3233 Vertical PCB Header with Flanges, THT, pitch 3.81mm, 05p; Manufacturer: Wurth Elektronik; Modularity: No; Rated Current: 10A; Working Voltage: 300V (AC); Manufacturer Part Number: 691323300005; Product Series: WR-TBL; ComponentLink1Description: Website Link; ComponentLink1URL: https://www.we-online.com; ComponentLink2Description: Datasheet Link; ComponentLink2URL: https://www.we-online.com/components/products/datasheet/691323300005; Mount: Through Hole; Operating Temperature Min: -40degC; Operating Temperature Max: 105degC; Packaging: Box; Application: Pluggable; Number of Pins: 5; Number of Rows: 1; Orientation: Vertical; Lead Pitch: 3.81mm
footprint 691323300005
pins: 1, 2, 3, 4, 5

## 691323300006
designator P?  (value not drawn)
WR-TBL Series 3233 Vertical PCB Header with Flanges, THT, pitch 3.81mm, 06p; Manufacturer: Wurth Elektronik; Modularity: No; Rated Current: 10A; Working Voltage: 300V (AC); Manufacturer Part Number: 691323300006; Product Series: WR-TBL; ComponentLink1Description: Website Link; ComponentLink1URL: https://www.we-online.com; ComponentLink2Description: Datasheet Link; ComponentLink2URL: https://www.we-online.com/components/products/datasheet/691323300006; Mount: Through Hole; Operating Temperature Min: -40degC; Operating Temperature Max: 105degC; Packaging: Box; Application: Pluggable; Number of Pins: 6; Number of Rows: 1; Orientation: Vertical; Lead Pitch: 3.81mm
footprint 691323300006
pins: 1, 2, 3, 4, 5, 6

## 691323300007
designator P?  (value not drawn)
WR-TBL Series 3233 Vertical PCB Header with Flanges, THT, pitch 3.81mm, 07p; Manufacturer: Wurth Elektronik; Modularity: No; Rated Current: 10A; Working Voltage: 300V (AC); Manufacturer Part Number: 691323300007; Product Series: WR-TBL; ComponentLink1Description: Website Link; ComponentLink1URL: https://www.we-online.com; ComponentLink2Description: Datasheet Link; ComponentLink2URL: https://www.we-online.com/components/products/datasheet/691323300007; Mount: Through Hole; Operating Temperature Min: -40degC; Operating Temperature Max: 105degC; Packaging: Box; Application: Pluggable; Number of Pins: 7; Number of Rows: 1; Orientation: Vertical; Lead Pitch: 3.81mm
footprint 691323300007
pins: 1, 2, 3, 4, 5, 6, 7

## 691323300008
designator P?  (value not drawn)
WR-TBL Series 3233 Vertical PCB Header with Flanges, THT, pitch 3.81mm, 08p; Manufacturer: Wurth Elektronik; Modularity: No; Rated Current: 10A; Working Voltage: 300V (AC); Manufacturer Part Number: 691323300008; Product Series: WR-TBL; ComponentLink1Description: Website Link; ComponentLink1URL: https://www.we-online.com; ComponentLink2Description: Datasheet Link; ComponentLink2URL: https://www.we-online.com/components/products/datasheet/691323300008; Mount: Through Hole; Operating Temperature Min: -40degC; Operating Temperature Max: 105degC; Packaging: Box; Application: Pluggable; Number of Pins: 8; Number of Rows: 1; Orientation: Vertical; Lead Pitch: 3.81mm
footprint 691323300008
pins: 1, 2, 3, 4, 5, 6, 7, 8

## 691323300012
designator P?  (value not drawn)
WR-TBL Series 3233 Vertical PCB Header with Flanges, THT, pitch 3.81mm, 12p; Manufacturer: Wurth Elektronik; Modularity: No; Rated Current: 10A; Working Voltage: 300V (AC); Manufacturer Part Number: 691323300012; Product Series: WR-TBL; ComponentLink1Description: Website Link; ComponentLink1URL: https://www.we-online.com; ComponentLink2Description: Datasheet Link; ComponentLink2URL: https://www.we-online.com/components/products/datasheet/691323300012; Mount: Through Hole; Operating Temperature Min: -40degC; Operating Temperature Max: 105degC; Packaging: Box; Application: Pluggable; Number of Pins: 12; Number of Rows: 1; Orientation: Vertical; Lead Pitch: 3.81mm
footprint 691323300012
pins: 1, 2, 3, 4, 5, 6, 7, 8, 9, 10, 11, 12

## 691325110002
designator P?  (value not drawn)
WR-TBL Series 3251 Horizontal PCB Header with Flanges, THT, pitch 3.5mm, 02p; Manufacturer: Wurth Elektronik; Modularity: No; Rated Current: 10A; Working Voltage: 300V (AC); Manufacturer Part Number: 691325110002; Product Series: WR-TBL; ComponentLink1Description: Website Link; ComponentLink1URL: https://www.we-online.com; ComponentLink2Description: Datasheet Link; ComponentLink2URL: https://www.we-online.com/components/products/datasheet/691325110002; Mount: Through Hole; Operating Temperature Min: -40degC; Operating Temperature Max: 105degC; Packaging: Box; Application: Pluggable; Number of Pins: 2; Number of Rows: 1; Orientation: Horizontal; Lead Pitch: 3.5mm
footprint 691325110002
pins: 1, 2

## 691325110003
designator P?  (value not drawn)
WR-TBL Series 3251 Horizontal PCB Header with Flanges, THT, pitch 3.5mm, 03p; Manufacturer: Wurth Elektronik; Modularity: No; Rated Current: 10A; Working Voltage: 300V (AC); Manufacturer Part Number: 691325110003; Product Series: WR-TBL; ComponentLink1Description: Website Link; ComponentLink1URL: https://www.we-online.com; ComponentLink2Description: Datasheet Link; ComponentLink2URL: https://www.we-online.com/components/products/datasheet/691325110003; Mount: Through Hole; Operating Temperature Min: -40degC; Operating Temperature Max: 105degC; Packaging: Box; Application: Pluggable; Number of Pins: 3; Number of Rows: 1; Orientation: Horizontal; Lead Pitch: 3.5mm
footprint 691325110003
pins: 1, 2, 3

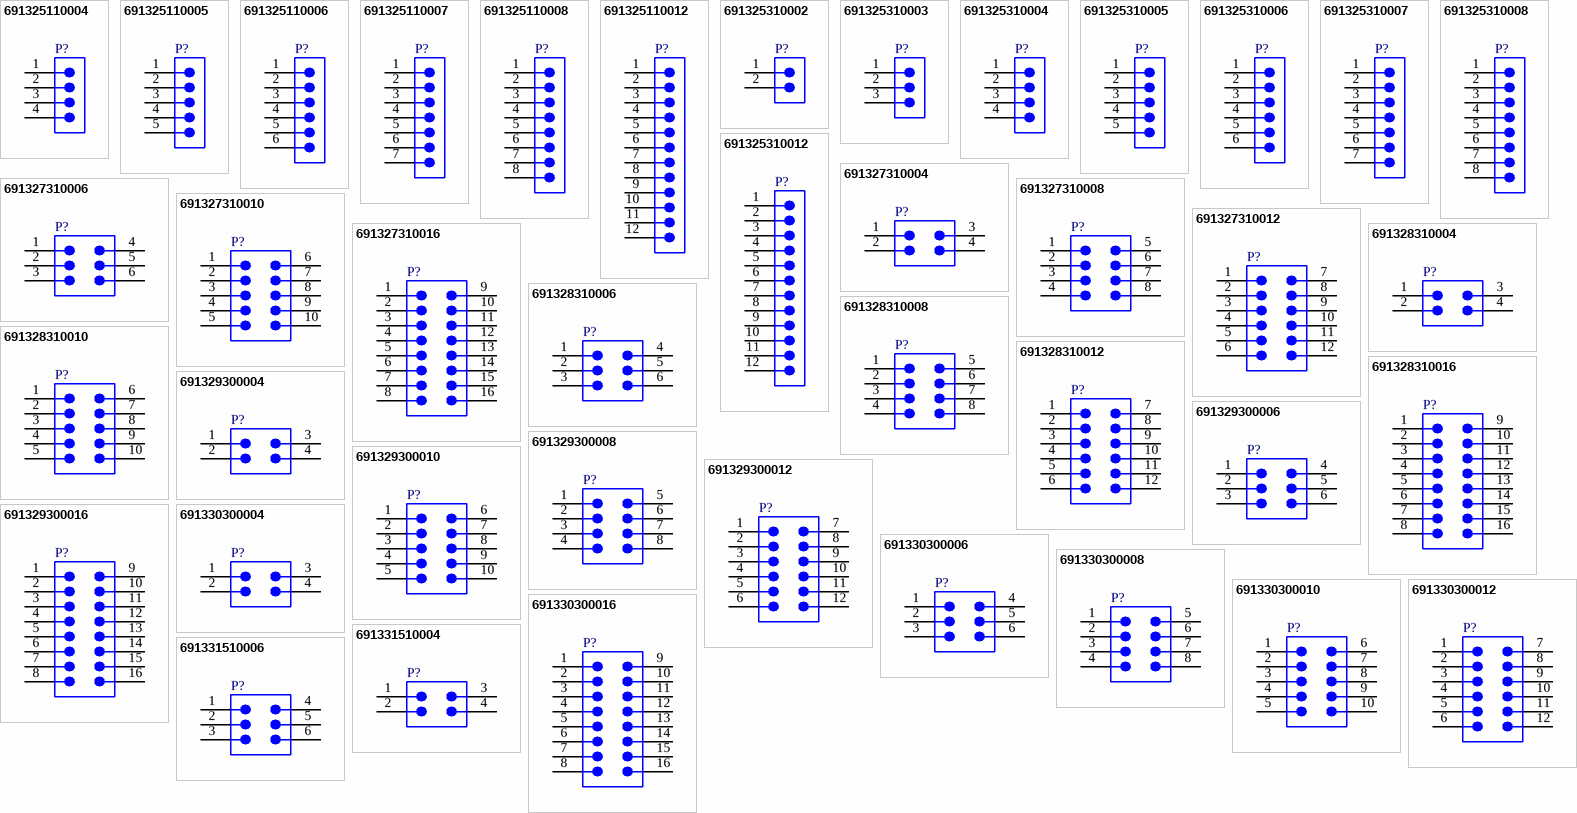
[diagram p11: symbols 691325110004 to 691331510006]

## 691325110004
designator P?  (value not drawn)
WR-TBL Series 3251 Horizontal PCB Header with Flanges, THT, pitch 3.5mm, 04p; Manufacturer: Wurth Elektronik; Modularity: No; Rated Current: 10A; Working Voltage: 300V (AC); Manufacturer Part Number: 691325110004; Product Series: WR-TBL; ComponentLink1Description: Website Link; ComponentLink1URL: https://www.we-online.com; ComponentLink2Description: Datasheet Link; ComponentLink2URL: https://www.we-online.com/components/products/datasheet/691325110004; Mount: Through Hole; Operating Temperature Min: -40degC; Operating Temperature Max: 105degC; Packaging: Box; Application: Pluggable; Number of Pins: 4; Number of Rows: 1; Orientation: Horizontal; Lead Pitch: 3.5mm
footprint 691325110004
pins: 1, 2, 3, 4

## 691325110005
designator P?  (value not drawn)
WR-TBL Series 3251 Horizontal PCB Header with Flanges, THT, pitch 3.5mm, 05p; Manufacturer: Wurth Elektronik; Modularity: No; Rated Current: 10A; Working Voltage: 300V (AC); Manufacturer Part Number: 691325110005; Product Series: WR-TBL; ComponentLink1Description: Website Link; ComponentLink1URL: https://www.we-online.com; ComponentLink2Description: Datasheet Link; ComponentLink2URL: https://www.we-online.com/components/products/datasheet/691325110005; Mount: Through Hole; Operating Temperature Min: -40degC; Operating Temperature Max: 105degC; Packaging: Box; Application: Pluggable; Number of Pins: 5; Number of Rows: 1; Orientation: Horizontal; Lead Pitch: 3.5mm
footprint 691325110005
pins: 1, 2, 3, 4, 5

## 691325110006
designator P?  (value not drawn)
WR-TBL Series 3251 Horizontal PCB Header with Flanges, THT, pitch 3.5mm, 06p; Manufacturer: Wurth Elektronik; Modularity: No; Rated Current: 10A; Working Voltage: 300V (AC); Manufacturer Part Number: 691325110006; Product Series: WR-TBL; ComponentLink1Description: Website Link; ComponentLink1URL: https://www.we-online.com; ComponentLink2Description: Datasheet Link; ComponentLink2URL: https://www.we-online.com/components/products/datasheet/691325110006; Mount: Through Hole; Operating Temperature Min: -40degC; Operating Temperature Max: 105degC; Packaging: Box; Application: Pluggable; Number of Pins: 6; Number of Rows: 1; Orientation: Horizontal; Lead Pitch: 3.5mm
footprint 691325110006
pins: 1, 2, 3, 4, 5, 6

## 691325110007
designator P?  (value not drawn)
WR-TBL Series 3251 Horizontal PCB Header with Flanges, THT, pitch 3.5mm, 07p; Manufacturer: Wurth Elektronik; Modularity: No; Rated Current: 10A; Working Voltage: 300V (AC); Manufacturer Part Number: 691325110007; Product Series: WR-TBL; ComponentLink1Description: Website Link; ComponentLink1URL: https://www.we-online.com; ComponentLink2Description: Datasheet Link; ComponentLink2URL: https://www.we-online.com/components/products/datasheet/691325110007; Mount: Through Hole; Operating Temperature Min: -40degC; Operating Temperature Max: 105degC; Packaging: Box; Application: Pluggable; Number of Pins: 7; Number of Rows: 1; Orientation: Horizontal; Lead Pitch: 3.5mm
footprint 691325110007
pins: 1, 2, 3, 4, 5, 6, 7

## 691325110008
designator P?  (value not drawn)
WR-TBL Series 3251 Horizontal PCB Header with Flanges, THT, pitch 3.5mm, 08p; Manufacturer: Wurth Elektronik; Modularity: No; Rated Current: 10A; Working Voltage: 300V (AC); Manufacturer Part Number: 691325110008; Product Series: WR-TBL; ComponentLink1Description: Website Link; ComponentLink1URL: https://www.we-online.com; ComponentLink2Description: Datasheet Link; ComponentLink2URL: https://www.we-online.com/components/products/datasheet/691325110008; Mount: Through Hole; Operating Temperature Min: -40degC; Operating Temperature Max: 105degC; Packaging: Box; Application: Pluggable; Number of Pins: 8; Number of Rows: 1; Orientation: Horizontal; Lead Pitch: 3.5mm
footprint 691325110008
pins: 1, 2, 3, 4, 5, 6, 7, 8

## 691325110012
designator P?  (value not drawn)
WR-TBL Series 3251 Horizontal PCB Header with Flanges, THT, pitch 3.5mm, 12p; Manufacturer: Wurth Elektronik; Modularity: No; Rated Current: 10A; Working Voltage: 300V (AC); Manufacturer Part Number: 691325110012; Product Series: WR-TBL; ComponentLink1Description: Website Link; ComponentLink1URL: https://www.we-online.com; ComponentLink2Description: Datasheet Link; ComponentLink2URL: https://www.we-online.com/components/products/datasheet/691325110012; Mount: Through Hole; Operating Temperature Min: -40degC; Operating Temperature Max: 105degC; Packaging: Box; Application: Pluggable; Number of Pins: 12; Number of Rows: 1; Orientation: Horizontal; Lead Pitch: 3.5mm
footprint 691325110012
pins: 1, 2, 3, 4, 5, 6, 7, 8, 9, 10, 11, 12

## 691325310002
designator P?  (value not drawn)
WR-TBL Series 3253 Horizontal PCB Header with Flanges, THT, pitch 3.81mm, 02p; Manufacturer: Wurth Elektronik; Modularity: No; Rated Current: 10A; Working Voltage: 300V (AC); Manufacturer Part Number: 691325310002; Product Series: WR-TBL; ComponentLink1Description: Website Link; ComponentLink1URL: https://www.we-online.com; ComponentLink2Description: Datasheet Link; ComponentLink2URL: https://www.we-online.com/components/products/datasheet/691325310002; Mount: Through Hole; Operating Temperature Min: -40degC; Operating Temperature Max: 105degC; Packaging: Box; Application: Pluggable; Number of Pins: 2; Number of Rows: 1; Orientation: Horizontal; Lead Pitch: 3.81mm
footprint 691325310002
pins: 1, 2

## 691325310003
designator P?  (value not drawn)
WR-TBL Series 3253 Horizontal PCB Header with Flanges, THT, pitch 3.81mm, 03p; Manufacturer: Wurth Elektronik; Modularity: No; Rated Current: 10A; Working Voltage: 300V (AC); Manufacturer Part Number: 691325310003; Product Series: WR-TBL; ComponentLink1Description: Website Link; ComponentLink1URL: https://www.we-online.com; ComponentLink2Description: Datasheet Link; ComponentLink2URL: https://www.we-online.com/components/products/datasheet/691325310003; Mount: Through Hole; Operating Temperature Min: -40degC; Operating Temperature Max: 105degC; Packaging: Box; Application: Pluggable; Number of Pins: 3; Number of Rows: 1; Orientation: Horizontal; Lead Pitch: 3.81mm
footprint 691325310003
pins: 1, 2, 3